# Altium schematic symbol library Schlib1.SchLib: 36 symbols
Pins are listed as number, name and electrical type; pins without a type are passive.

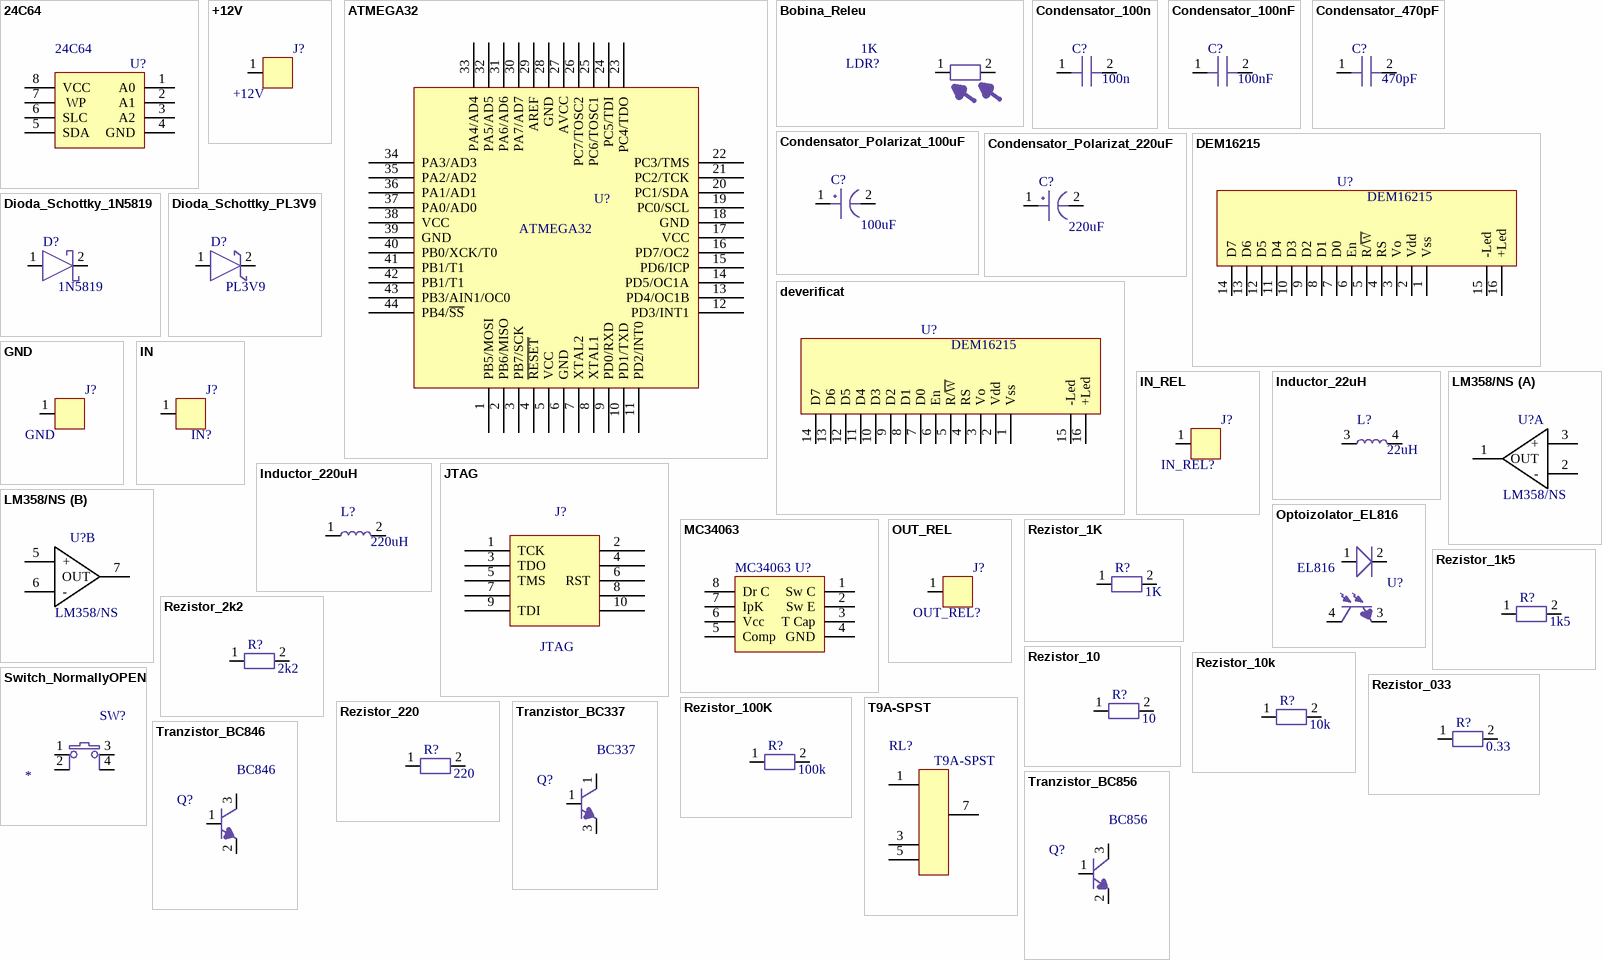
[diagram p0: symbols 24C64 to Tranzistor_BC856]

## 24C64
designator U?
Manufacturer: *; Manufacturer Order Code: *; ComponentLink1Description: DataSheet; ComponentLink1URL: *
pins: 1 A0, 2 A1, 3 A2, 4 GND, 5 SDA, 6 SLC, 7  WP, 8 VCC

## +12V
designator J?
Manufacturer: *; Manufacturer Order Code: *; ComponentLink1Description: DataSheet; ComponentLink1URL: *
pins: 1 38

## ATMEGA32
designator U?
Manufacturer: *; Manufacturer Order Code: *; ComponentLink1Description: DataSheet; ComponentLink1URL: *
pins: 1 PB5/MOSI, 2 PB6/MISO, 3 PB7/SCK, 4 ~{RESET}, 5 VCC, 6 GND, 7 XTAL2, 8 XTAL1, 9 PD0/RXD, 10 PD1/TXD, 11 PD2/INT0, 12 PD3/INT1, 13 PD4/OC1B, 14 PD5/OC1A, 15 PD6/ICP, 16 PD7/OC2, 17 VCC, 18 GND, 19 PC0/SCL, 20 PC1/SDA, 21 PC2/TCK, 22 PC3/TMS, 23 PC4/TDO, 24 PC5/TDI, 25 PC6/TOSC1, 26 PC7/TOSC2, 27 AVCC, 28 GND, 29 AREF, 30 PA7/AD7, 31 PA6/AD6, 32 PA5/AD5, 33 PA4/AD4, 34 PA3/AD3, 35 PA2/AD2, 36 PA1/AD1, 37 PA0/AD0, 38 VCC, 39 GND, 40 PB0/XCK/T0, 41 PB1/T1, 42 PB1/T1, 43 PB3/AIN1/OC0, 44 PB4/~{SS}

## Bobina_Releu
designator LDR?, comment 1K
ComponentLink1Description: DataSheet; ComponentLink1URL: *; Manufacturer Order Code: *; Manufacturer: *
pins: 1 3, 2 4

## Condensator_100n
designator C?, comment 100n
ComponentLink1Description: DataSheet; ComponentLink1URL: *; Manufacturer: *; Manufacturer Order Code: *
pins: 1 10, 2 11

## Condensator_100nF
designator C?, comment 100nF
ComponentLink1Description: DataSheet; ComponentLink1URL: *; Manufacturer: *; Manufacturer Order Code: *
pins: 1 10, 2 11

## Condensator_470pF
designator C?, comment 470pF
ComponentLink1Description: DataSheet; ComponentLink1URL: *; Manufacturer: *; Manufacturer Order Code: *
pins: 1 10, 2 11

## Condensator_Polarizat_100uF
designator C?, comment 100uF
ComponentLink1Description: New link; ComponentLink1URL: *; Manufacturer: *; Manufacturer Order Code: *
pins: 1 10, 2 11

## Condensator_Polarizat_220uF
designator C?, comment 220uF
ComponentLink1Description: New link; ComponentLink1URL: *; Manufacturer: *; Manufacturer Order Code: *
pins: 1 10, 2 11

## DEM16215
designator U?
Manufacturer: *; Manufacturer Order Code: *; ComponentLink1Description: DataSheet; ComponentLink1URL: *
pins: 1 Vss, 2 Vdd, 3 Vo, 4 RS, 5 R/~{W}, 6 En, 7 D0, 8 D1, 9 D2, 10 D3, 11 D4, 12 D5, 13 D6, 14 D7, 15 -Led, 16 +Led

## deverificat
designator U?, comment DEM16215
Manufacturer: *; Manufacturer Order Code: *; ComponentLink1Description: DataSheet; ComponentLink1URL: *
pins: 1 Vss, 2 Vdd, 3 Vo, 4 RS, 5 R/~{W}, 6 En, 7 D0, 8 D1, 9 D2, 10 D3, 11 D4, 12 D5, 13 D6, 14 D7, 15 -Led, 16 +Led

## Dioda_Schottky_1N5819
designator D?, comment 1N5819
Manufacturer: *; Manufacturer Order Code: *; ComponentLink1Description: New link; ComponentLink1URL: *
pins: 1 18, 2 19

## Dioda_Schottky_PL3V9
designator D?, comment PL3V9
Manufacturer: *; Manufacturer Order Code: *; ComponentLink1Description: New link; ComponentLink1URL: *
pins: 1 18, 2 19

## GND
designator J?
Manufacturer: *; Manufacturer Order Code: *; ComponentLink1Description: DataSheet; ComponentLink1URL: *
pins: 1 38

## IN
designator J?, comment IN?
Manufacturer: *; Manufacturer Order Code: *; ComponentLink1Description: DataSheet; ComponentLink1URL: *
pins: 1 38

## IN_REL
designator J?, comment IN_REL?
Manufacturer: *; Manufacturer Order Code: *; ComponentLink1Description: DataSheet; ComponentLink1URL: *
pins: 1 38

## Inductor_22uH
designator L?, comment 22uH
ComponentLink1Description: DataSheet; ComponentLink1URL: *; Manufacturer Order Code: *; Manufacturer: *
pins: 3, 4

## Inductor_220uH
designator L?, comment 220uH
ComponentLink1Description: DataSheet; ComponentLink1URL: *; Manufacturer Order Code: *; Manufacturer: *
pins: 1 3, 2 4

## JTAG
designator J?
Manufacturer: *; Manufacturer Order Code: *; ComponentLink1Description: New link; ComponentLink1URL: *
pins: 1 TCK, 2, 3 TDO, 4, 5 TMS, 6 RST, 7, 8, 9 TDI, 10

## LM358/NS
designator U?
ComponentLink1Description: DataSheet; ComponentLink1URL: *; Manufacturer: *; Manufacturer Order Code: *
part A pins: 1 OUT, 2 -, 3 +
part B pins: 5 +, 6 -, 7 OUT

## MC34063
designator U?
Manufacturer: onsemi; ComponentLink1Description: DataSheet; ComponentLink1URL: https://www.onsemi.com/pdf/datasheet/mc34063a-d.pdf; Manufacturer Order Code: MC34063
pins: 1 Sw C, 2 Sw E, 3 T Cap, 4 GND, 5 Comp, 6 Vcc, 7 IpK, 8 Dr C

## Optoizolator_EL816
designator U?, comment EL816
Manufacturer: *; Manufacturer Order Code: *; ComponentLink1Description: DataSheet; ComponentLink1URL: *
pins: 1 18, 2 19, 3 22, 4 20

## OUT_REL
designator J?, comment OUT_REL?
Manufacturer: *; Manufacturer Order Code: *; ComponentLink1Description: DataSheet; ComponentLink1URL: *
pins: 1 38

## Rezistor_1K
designator R?, comment 1K
ComponentLink1Description: DataSheet; ComponentLink1URL: *; Manufacturer Order Code: *; Manufacturer: *
pins: 1 3, 2 4

## Rezistor_1k5
designator R?, comment 1k5
ComponentLink1Description: DataSheet; ComponentLink1URL: *; Manufacturer Order Code: *; Manufacturer: *
pins: 1 3, 2 4

## Rezistor_2k2
designator R?, comment 2k2
ComponentLink1Description: DataSheet; ComponentLink1URL: *; Manufacturer Order Code: *; Manufacturer: *
pins: 1 3, 2 4

## Rezistor_10
designator R?, comment 10
ComponentLink1Description: DataSheet; ComponentLink1URL: *; Manufacturer Order Code: *; Manufacturer: *
pins: 1 3, 2 4

## Rezistor_10k
designator R?, comment 10k
ComponentLink1Description: DataSheet; ComponentLink1URL: *; Manufacturer Order Code: *; Manufacturer: *
pins: 1 3, 2 4

## Rezistor_033
designator R?, comment 0.33
ComponentLink1Description: DataSheet; ComponentLink1URL: *; Manufacturer Order Code: *; Manufacturer: *
pins: 1 3, 2 4

## Rezistor_100K
designator R?, comment 100k
ComponentLink1Description: DataSheet; ComponentLink1URL: *; Manufacturer Order Code: *; Manufacturer: *
pins: 1 3, 2 4

## Rezistor_220
designator R?, comment 220
ComponentLink1Description: DataSheet; ComponentLink1URL: *; Manufacturer Order Code: *; Manufacturer: *
pins: 1 3, 2 4

## Switch_NormallyOPEN
designator SW?
Manufacturer: *; Manufacturer Order Code: *; ComponentLink1Description: DataSheet; ComponentLink1URL: *
pins: 1 25, 2 24, 3 26, 4 23

## T9A-SPST
designator RL?
Manufacturer: *; Manufacturer Order Code: *; ComponentLink1Description: DataSheet; ComponentLink1URL: *
pins: 1 34, 3 35, 5 36, 7 37

## Tranzistor_BC337
designator Q?, comment BC337
Manufacturer: *; Manufacturer Order Code: *; ComponentLink1Description: DataSheet; ComponentLink1URL: *
pins: 1 30, 1 31, 3 31

## Tranzistor_BC846
designator Q?, comment BC846
Manufacturer: *; Manufacturer Order Code: *; ComponentLink1Description: DataSheet; ComponentLink1URL: *
pins: 1 30, 2 31, 3

## Tranzistor_BC856
designator Q?, comment BC856
Manufacturer: *; Manufacturer Order Code: *; ComponentLink1Description: DataSheet; ComponentLink1URL: *
pins: 1 3, 2 31, 3 31